# Altium schematic symbol library OS102011MA1QN1.SCHLIB: 1 symbol
Pins are listed as number, name and electrical type; pins without a type are passive.

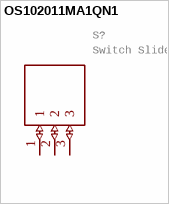
[diagram p0: symbol OS102011MA1QN1]

## OS102011MA1QN1
designator S?, comment Switch Slide Right Angle SPDT 0.1A 12VDC Through Hole Slide Switch SPDT On-On 0.1 A@ 12 V dc Slide   Source:  Datasheet
MANUFACTURER_NAME: C & K COMPONENTS; GateName_1: G$1; SymbolName_1: OS102011MA1QN1; LibraryName: OS102011MA1QN1; DeviceSetName: OS102011MA1QN1; Package: OS102011MA1QN1; DESCRIPTION: Switch Slide Right Angle SPDT 0.1A 12VDC Through Hole Slide Switch SPDT On-On 0.1 A@ 12 V dc Slide; HEIGHT: mm; MANUFACTURER_PART_NUMBER: OS102011MA1QN1; MOUSER_PART_NUMBER: 611-OS102011MA1QN1; MOUSER_PRICE-STOCK: https://www.mouser.co.uk/ProductDetail/CK/OS102011MA1QN1?qs=WtljUlYws5R6MUgHcLkz4w%3D%3D
footprint OS102011MA1QN1
pins: 1 (io), 2 (io), 3 (io)